# EAGLE library part T37_TRIFILAR_TRANSFORMER (library HansToroid)
Transformer (having 3 windings) on a T37 Toroid
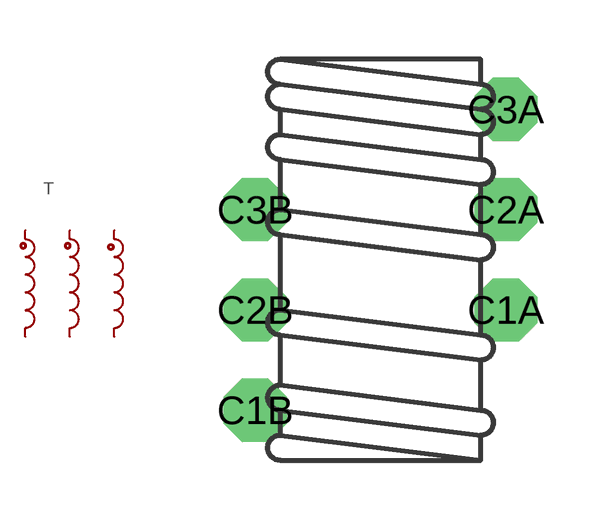
[diagram p1: symbol with the pads of T37_TRIFILAR_TRANSFORMER; footprint T37_TRIFILAR_TRANSFORMER]

Designator prefix T

## T37_TRIFILAR_TRANSFORMER  [T37_TRIFILAR_TRANSFORMER]
C1A  C1A
C1B  C1B
C2A  C2A
C2B  C2B
C3A  C3A
C3B  C3B

## Footprint T37_TRIFILAR_TRANSFORMER (pad centres in mm)
Transformer wound on a T37 Toroid
drill 0.914 pad 1.6 octagon: C1A 3.175,-1.27; C1B -3.175,-3.81; C2A 3.175,1.27; C2B -3.175,-1.27; C3A 3.175,3.81; C3B -3.175,1.27